# Altium schematic symbol library aksima_ugo.SchLib: 46 symbols
Pins are listed as number, name and electrical type; pins without a type are passive.

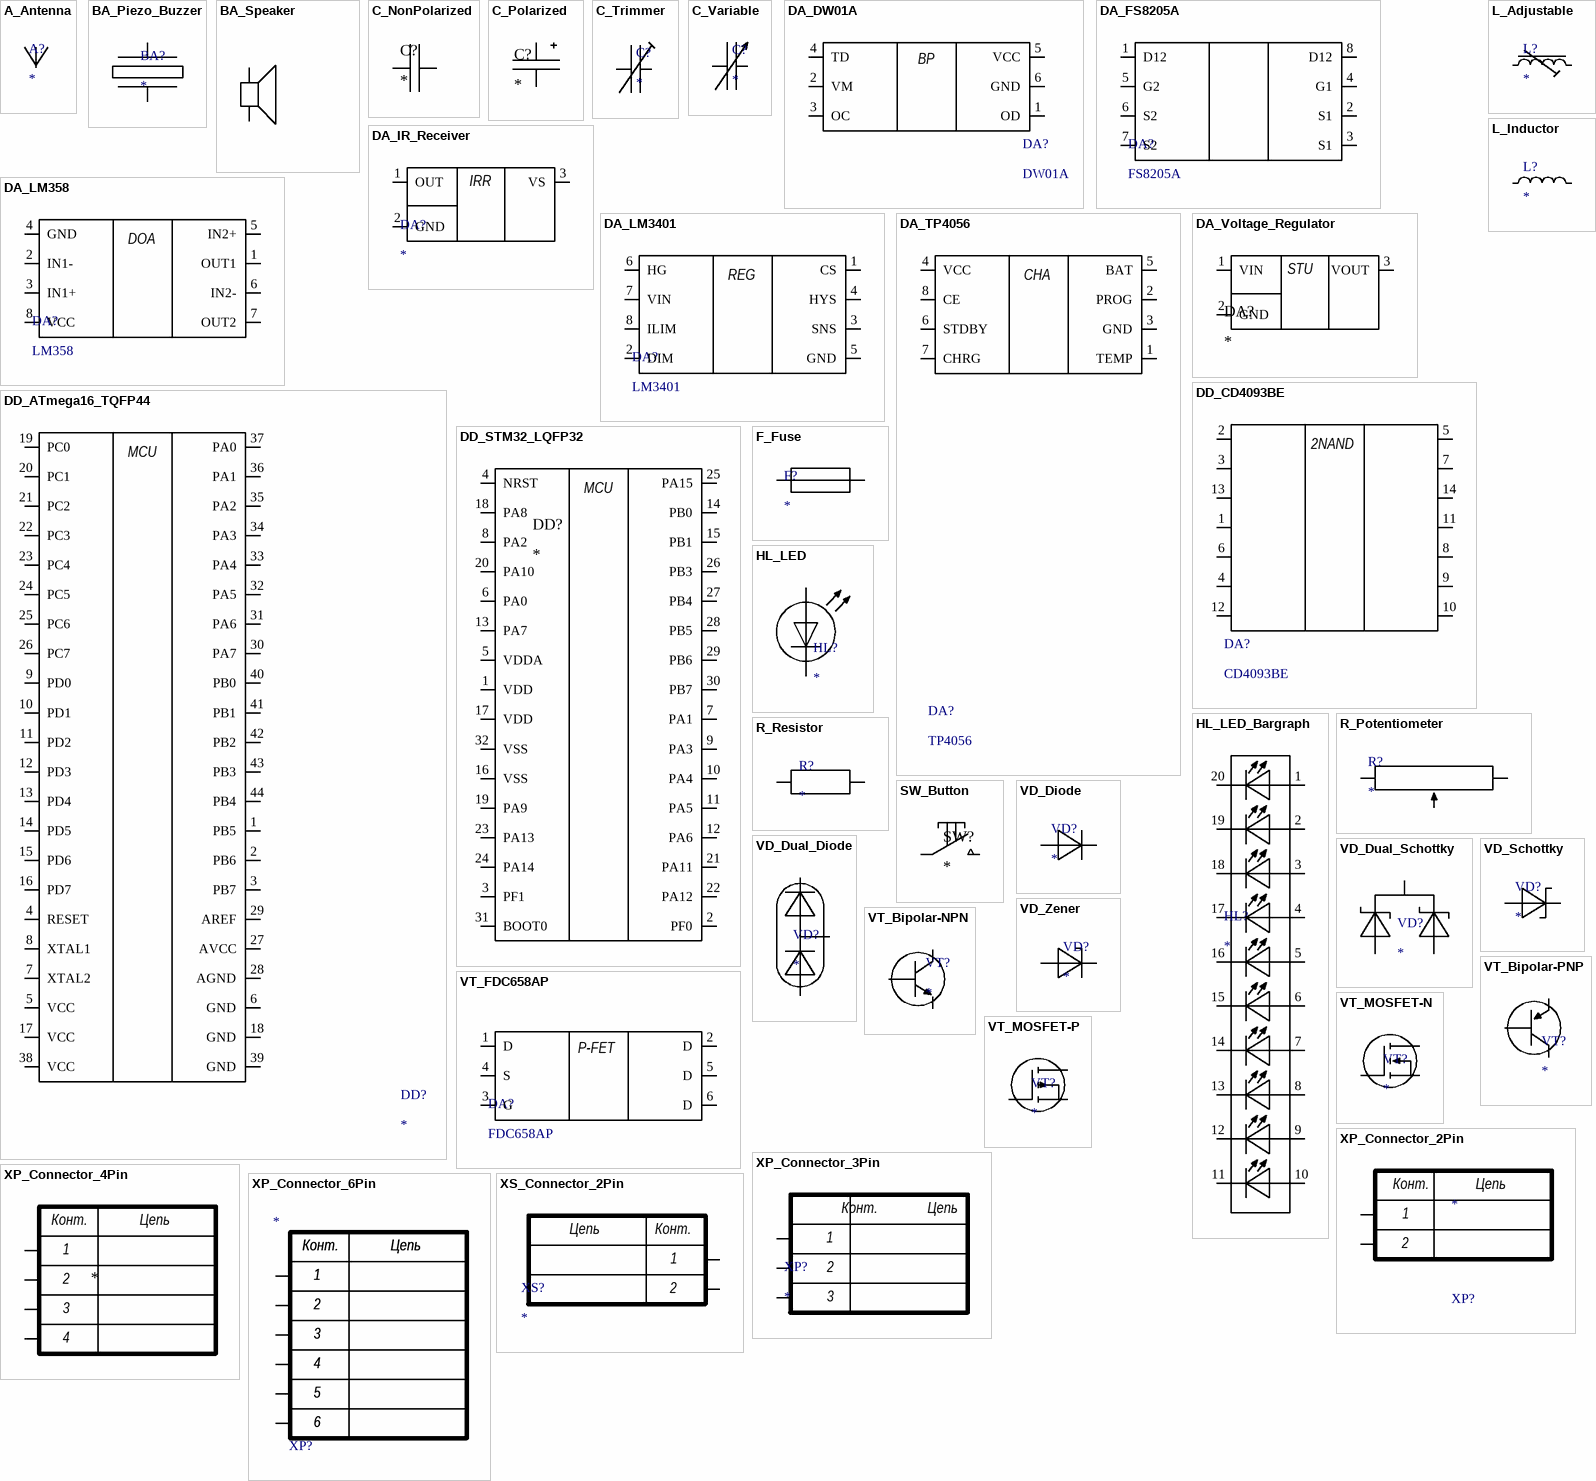
[diagram p0: symbols A_Antenna to XS_Connector_2Pin]

## A_Antenna
designator A?
Antenna; Value: *
footprint A_Antenna
pins: 1

## BA_Piezo_Buzzer
designator BA?
Piezoelectric sounder; Value: *
footprint BA_PS12 BUZZER
pins: 1, 2

## BA_Speaker
designator BA?
Loudspeaker; Value: *
footprint BA_Speaker
pins: 1, 2

## C_NonPolarized
designator C?
Non-polarized capacitor; Value: *
footprint C_0805 (Chip Capacitor, 2-Leads, Body 2.00x1.20mm, IPC High Density)
footprint C_MLCC
footprint C_1206
pins: 1, 2

## C_Polarized
designator C?
Polarized capacitor; Value: *
footprint C+_5mm
footprint C+_10MM
footprint C+_SMD 6,6MM (Aluminum Electrolytic Capacitor, Body 6.60x6.60x5.40mm, IPC Low Density)
footprint C+_6,3 MM
footprint C+_TCAP_SMD-B
footprint C+_TCAP_SMD-A
pins: 1, 2

## C_Trimmer
designator C?
Trimmer capacitor; Value: *
footprint C_variable capacitor
pins: 1, 2

## C_Variable
designator C?
Variable capacitor; Value: *
pins: 1, 2

## DA_DW01A
designator DA?, comment DW01A
Single-cell lithium-ion battery protection IC; Value: DW01A
footprint DA_SOT23-6 (SOT143-4 per SP0503BAHTG (WRONG PIN ORDER))
pins: 1 OD, 2 VM, 3 OC, 4 TD, 5 VCC, 6 GND
text: BP

## DA_FS8205A
designator DA?, comment FS8205A
Dual N-channel MOSFET; Value: FS8205A
footprint DA_Atmel TSSOP-8 8X (TSSOP, 8-Leads, Body 3.00x4.40mm, Pitch 0.65mm, IPC Medium Density)
pins: 1 D12, 2 S1, 3 S1, 4 G1, 5 G2, 6 S2, 7 S2, 8 D12

## DA_IR_Receiver
designator DA?
Infrared remote-control receiver; Value: *
footprint DA_TSOP31238
pins: 1 OUT, 2 GND, 3 VS
text: IRR

## DA_LM358
designator DA?, comment LM358
Dual operational amplifier; Value: LM358
footprint DA_DIP8
pins: 1 OUT1, 2 IN1-, 3 IN1+, 4 GND, 5 IN2+, 6 IN2-, 7 OUT2, 8 VCC
text: DOA

## DA_LM3401
designator DA?, comment LM3401
Hysteretic LED driver controller; Value: LM3401
footprint DA_MSOP8
pins: 1 CS, 2 DIM, 3 SNS, 4 HYS, 5 GND, 6 HG, 7 VIN, 8 ILIM
text: REG

## DA_TP4056
designator DA?, comment TP4056
Single-cell lithium-ion battery charger; Value: TP4056
footprint DA_TP4056
pins: 1 TEMP, 2 PROG, 3 GND, 4 VCC, 5 BAT, 6 STDBY, 7 CHRG, 8 CE
text: CHA

## DA_Voltage_Regulator
designator DA?
Linear voltage regulator; Value: *
footprint DA_sot223_ams1117
pins: 1 VIN, 2 GND, 3 VOUT
text: STU

## DD_ATmega16_TQFP44
designator DD?
8-bit AVR microcontroller, TQFP-44; Value: *
footprint DD_TQFP44_Atmega16
pins: 1 PB5, 2 PB6, 3 PB7, 4 RESET, 5 VCC, 6 GND, 7 XTAL2, 8 XTAL1, 9 PD0, 10 PD1, 11 PD2, 12 PD3, 13 PD4, 14 PD5, 15 PD6, 16 PD7, 17 VCC, 18 GND, 19 PC0, 20 PC1, 21 PC2, 22 PC3, 23 PC4, 24 PC5, 25 PC6, 26 PC7, 27 AVCC, 28 AGND, 29 AREF, 30 PA7, 31 PA6, 32 PA5, 33 PA4, 34 PA3, 35 PA2, 36 PA1, 37 PA0, 38 VCC, 39 GND, 40 PB0, 41 PB1, 42 PB2, 43 PB3, 44 PB4
text: MCU

## DD_CD4093BE
designator DA?, comment CD4093BE
Quad two-input Schmitt-trigger NAND gate; Value: CD4093BE
footprint DA_DIP14
pins: 1, 2, 3, 4, 5, 6, 7, 8, 9, 10, 11, 12, 13, 14
text: 2NAND

## DD_STM32_LQFP32
designator DD?
STM32 microcontroller, LQFP-32; Value: *
footprint DD_LQFP32_STM32
pins: 1 VDD, 2 PF0, 3 PF1, 4 NRST, 5 VDDA, 6 PA0, 7 PA1, 8 PA2, 9 PA3, 10 PA4, 11 PA5, 12 PA6, 13 PA7, 14 PB0, 15 PB1, 16 VSS, 17 VDD, 18 PA8, 19 PA9, 20 PA10, 21 PA11, 22 PA12, 23 PA13, 24 PA14, 25 PA15, 26 PB3, 27 PB4, 28 PB5, 29 PB6, 30 PB7, 31 BOOT0, 32 VSS
text: MCU

## F_Fuse
designator F?
Fuse; Value: *
footprint F_1206
footprint F_THT
pins: 1, 2

## HL_LED
designator HL?
Light-emitting diode; Value: *
footprint HL_LED3MM_GREEN
footprint HL_LED3MM_YELLOW
footprint HL_LED5MM_RED
pins: 1, 2

## HL_LED_Bargraph
designator HL?
LED bar-graph display; Value: *
footprint HL_DC-10GWA
pins: 1 2, 2, 3 2, 4 2, 5 2, 6 2, 7 2, 8 2, 9 2, 10 2, 11 2, 12 2, 13 2, 14 2, 15 2, 16 2, 17 2, 18 2, 19 2, 20 2

## L_Adjustable
designator L?
Inductor with adjustable core; Value: *
footprint L_Inductor MP
footprint L_Inductor MP
pins: 1, 2

## L_Inductor
designator L?
Inductor; Value: *
footprint L_1208
footprint L_Inductor
pins: 1, 2

## R_Potentiometer
designator R?
Potentiometer; Value: *
footprint R_Potentiometr (50K)
footprint R_3362P(POT)
pins: 1, 2, 3

## R_Resistor
designator R?
Fixed resistor; Value: *
footprint R_0805 (Chip Resistor, 2-Leads, Body 2.00x1.25mm, IPC Medium Density)
footprint R_1206
footprint R_C2-23
footprint R_2512 (Chip Resistor, 2-Leads, Body 6.30x3.15mm, IPC Medium Density)
footprint R_CF-25_C1-4
footprint R_SQP 5W
pins: 1, 2

## SW_Button
designator SW?
Push-button switch; Value: *
footprint SW_button
pins: 1, 2

## VD_Diode
designator VD?
Rectifier diode; Value: *
footprint VD_DO-41
footprint VD_DO-35
footprint VD_KD103A_KD30
pins: 1, 2

## VD_Dual_Diode
designator VD?
Dual switching diode; Value: *
footprint VD_SOT-23
pins: 1, 2, 3

## VD_Dual_Schottky
designator VD?
Dual Schottky rectifier; Value: *
footprint VD_TO-220AB (HIGH)
footprint VD_TO-220AB
pins: 1 A1, 2 K, 3 A2

## VD_Schottky
designator VD?
Schottky rectifier; Value: *
footprint VD_DO214AB SMC (Molded Diode, 2-Leads, Body 6.85x5.90mm, IPC Medium Density)
footprint VD_DO214AC SMA (Molded Diode, 2-Leads, Body 4.30x2.60mm, IPC Medium Density)
pins: 1, 2

## VD_Zener
designator VD?
Zener diode; Value: *
footprint VD_DO-41
pins: 1, 2

## VT_Bipolar-NPN
designator VT?
NPN bipolar transistor; Value: *
footprint VT_KT-13
footprint VT_TO-92
footprint VT_sot23
pins: 1 Б, 2 К, 3 Э

## VT_Bipolar-PNP
designator VT?
PNP bipolar transistor; Value: *
footprint VT_KT-13
footprint VT_TO-92
footprint VT_sot23
pins: 1 Б, 2 К, 3 Э

## VT_FDC658AP
designator DA?, comment FDC658AP
P-channel MOSFET; Value: FDC658AP
footprint DA_TSOT-23-6 (TSOT23, 6-Leads, Body 2.90x2.80mm, Pitch 0.95mm, IPC High Density)
pins: 1 D, 2 D, 3 G, 4 S, 5 D, 6 D
text: P-FET

## VT_MOSFET-N
designator VT?
N-channel MOSFET; Value: *
footprint VT_sot23
footprint VT_SOT223
pins: 1 И, 2 З, 3 С

## VT_MOSFET-P
designator VT?
P-channel MOSFET; Value: *
footprint VT_sot23
pins: 1 И, 2 З, 3 С

## XP_Connector_2Pin
designator XP?
2-pin connector (plug); Value: *
footprint X_CWF_2R
footprint X_KLS2
footprint X_PLS2
footprint X_MW-2M
footprint X_15EDGRC_2P
footprint X_15EDGVC_2P
pins: 1, 2
text: Конт.; Цепь

## XP_Connector_3Pin
designator XP?
3-pin connector (plug); Value: *
footprint X_15EDGVC_3P
pins: 1, 2, 3
text: Конт.; Цепь

## XP_Connector_4Pin
designator XP?
4-pin connector (plug); Value: *
footprint X_PLS4
pins: 1, 2, 3, 4
text: Конт.; Цепь

## XP_Connector_6Pin
designator XP?
6-pin connector (plug); Value: *
footprint X_PLD6
pins: 1, 1, 2, 2, 3, 3, 4, 4, 5, 5, 6, 6
text: Конт.; Цепь

## XS_Connector_2Pin
designator XS?
2-pin connector (socket); Value: *
footprint X_PLS2
footprint X_MW-2M
footprint X_KLS2
footprint X_CWF_2R
footprint X_15EDGRC_2P
footprint X_15EDGVC_2P
pins: 1, 2
text: Цепь; Конт.

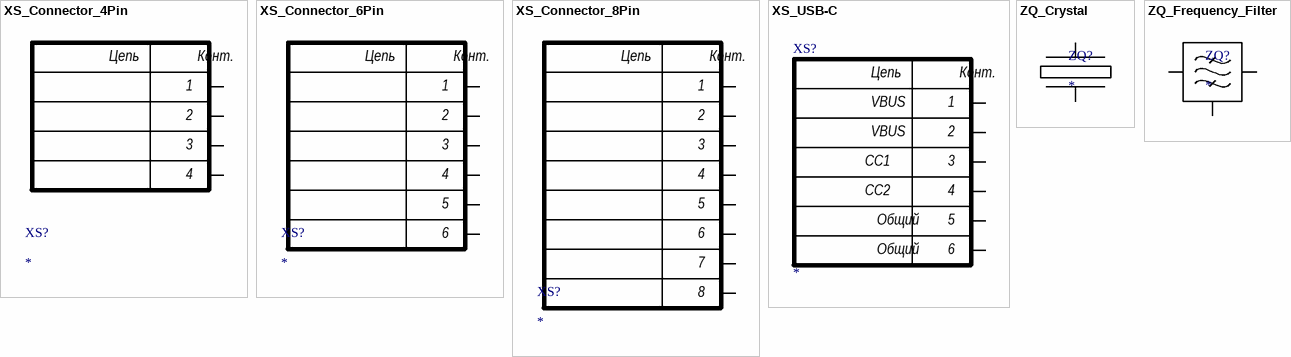
[diagram p1: symbols XS_Connector_4Pin to ZQ_Frequency_Filter]

## XS_Connector_4Pin
designator XS?
4-pin connector (socket); Value: *
footprint X_DS1022-R
pins: 1, 2, 3, 4
text: Цепь; Конт.

## XS_Connector_6Pin
designator XS?
6-pin connector (socket); Value: *
pins: 1, 2, 3, 4, 5, 6
text: Цепь; Конт.

## XS_Connector_8Pin
designator XS?
8-pin connector (socket); Value: *
footprint X_CWF-8R
pins: 1, 2, 3, 4, 5, 6, 7, 8
text: Цепь; Конт.

## XS_USB-C
designator XS?
USB Type-C receptacle; Value: *
footprint X_USB-C 6 pins
pins: C1, C2, C3, C4, C5, C6
text: Цепь; Конт.; VBUS; 1; 2; CC1; 3; CC2; 4; Общий; 5; 6

## ZQ_Crystal
designator ZQ?
Quartz crystal resonator; Value: *
footprint ZQ_HC49-S
pins: 1, 1, 2, 2

## ZQ_Frequency_Filter
designator ZQ?
Frequency filter; Value: *
footprint ZQ_piezofilter
pins: 1, 2, 3